# EAGLE library part 6100XX243021_610012243021 (library WR-PHD)
WR-PHD 2.54 mm SMT Dual Socket Header Bottom Entry Article Properties Pins 4 unitless; 6 unitless; 8 unitless; 10 unitless; 12 unitless; 16 unitless; 18 unitless; 20 unitless; 22 unitless; 24 unitless; 26 unitless; 32 unitless; 34 unitless; 40 unitless General Information Operating Temperature -40 °C up to +125 °C Compliance Lead free / RoHS Pitch 2.54 mm Durability 25 Mating cycles Rows Dual Gender Socket Header Type Bottom Entry Large Material Properties Insulator Material PA6T; PA9T Insulator Flammability Rating UL94 V-0 Contact Material Copper Alloy; Phosphor Bronze Contact Plating Gold Contact Type Stamped Certification UL Approval E323964 Packaging Properties Packaging Tape and Reel with Cap; Tube Electrical Properties IR 3 A Withstanding Voltage 500 V (AC); 600 V (AC) Contact Resistance 20 mΩ RISO 1000 MΩ <https://www.we-online.com/components/media/o33207v209%20Family_WR-PHD_610xxx243021.jpg> Details see: www.we-online.com/en/components/products/PHD_2_54_SMT_DUAL_SOCKET_HEADER_BOTTOM_ENTRY_6100XX243021 <www.we-online.com/catalog/PHD_2_54_SMT_DUAL_SOCKET_HEADER_BOTTOM_ENTRY_6100XX243021/?utm_source=eagle_model&utm_medium=description_link&utm_campaign=eisos_eagle> Updated by Ella Wu 2021-12-08 2021 (C) Würth Elektronik
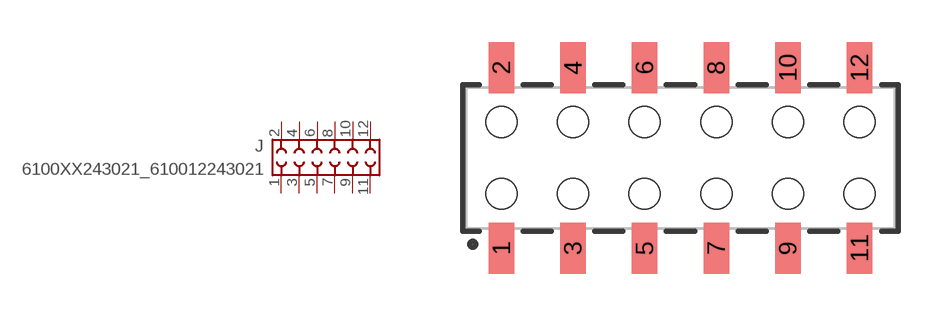
[diagram p223: symbol with the pads of 610012243021; footprint 610012243021]

Designator prefix J

## 6100XX243021_610012243021 (DATASHEET-URL: https://www.we-online.com/redexpert/spec/610012243021?ae; GENDER: Socket Header; IR: 3A; MOUNT: SMT; PACKAGING: Tube; PART-NUMBER: 610012243021; PINS: 12; PITCH: 2.54 mm; ROWS: Dual; TYPE: Bottom Entry Low Profile; VALUE: 610012243021)  [610012243021]
1  1  pas
2  2  pas
3  3  pas
4  4  pas
5  5  pas
6  6  pas
7  7  pas
8  8  pas
9  9  pas
10  10  pas
11  11  pas
12  12  pas

## Footprint 610012243021 (pad centres in mm)
WR-PHD 2.54 mm SMT Dual Socket Header Bottom Entry, 12Pins
smd 0.9 x 1.8: 1 -6.35,-3.2; 2 -6.35,3.2; 3 -3.81,-3.2; 4 -3.81,3.2; 5 -1.27,-3.2; 6 -1.27,3.2; 7 1.27,-3.2; 8 1.27,3.2; 9 3.81,-3.2; 10 3.81,3.2; 11 6.35,-3.2; 12 6.35,3.2
hole 1.1 at -6.35,1.27
hole 1.1 at -3.81,1.27
hole 1.1 at -3.81,-1.27
hole 1.1 at -6.35,-1.27
hole 1.1 at -1.27,1.27
hole 1.1 at -1.27,-1.27
hole 1.1 at 1.27,1.27
hole 1.1 at 1.27,-1.27
hole 1.1 at 3.81,-1.27
hole 1.1 at 3.81,1.27
hole 1.1 at 6.35,1.27
hole 1.1 at 6.35,-1.27